# Altium schematic symbol library ADSP-BF548_EZ_KIT_Lite_Schematic.SchLib: 4 symbols
Pins are listed as number, name and electrical type; pins without a type are passive.

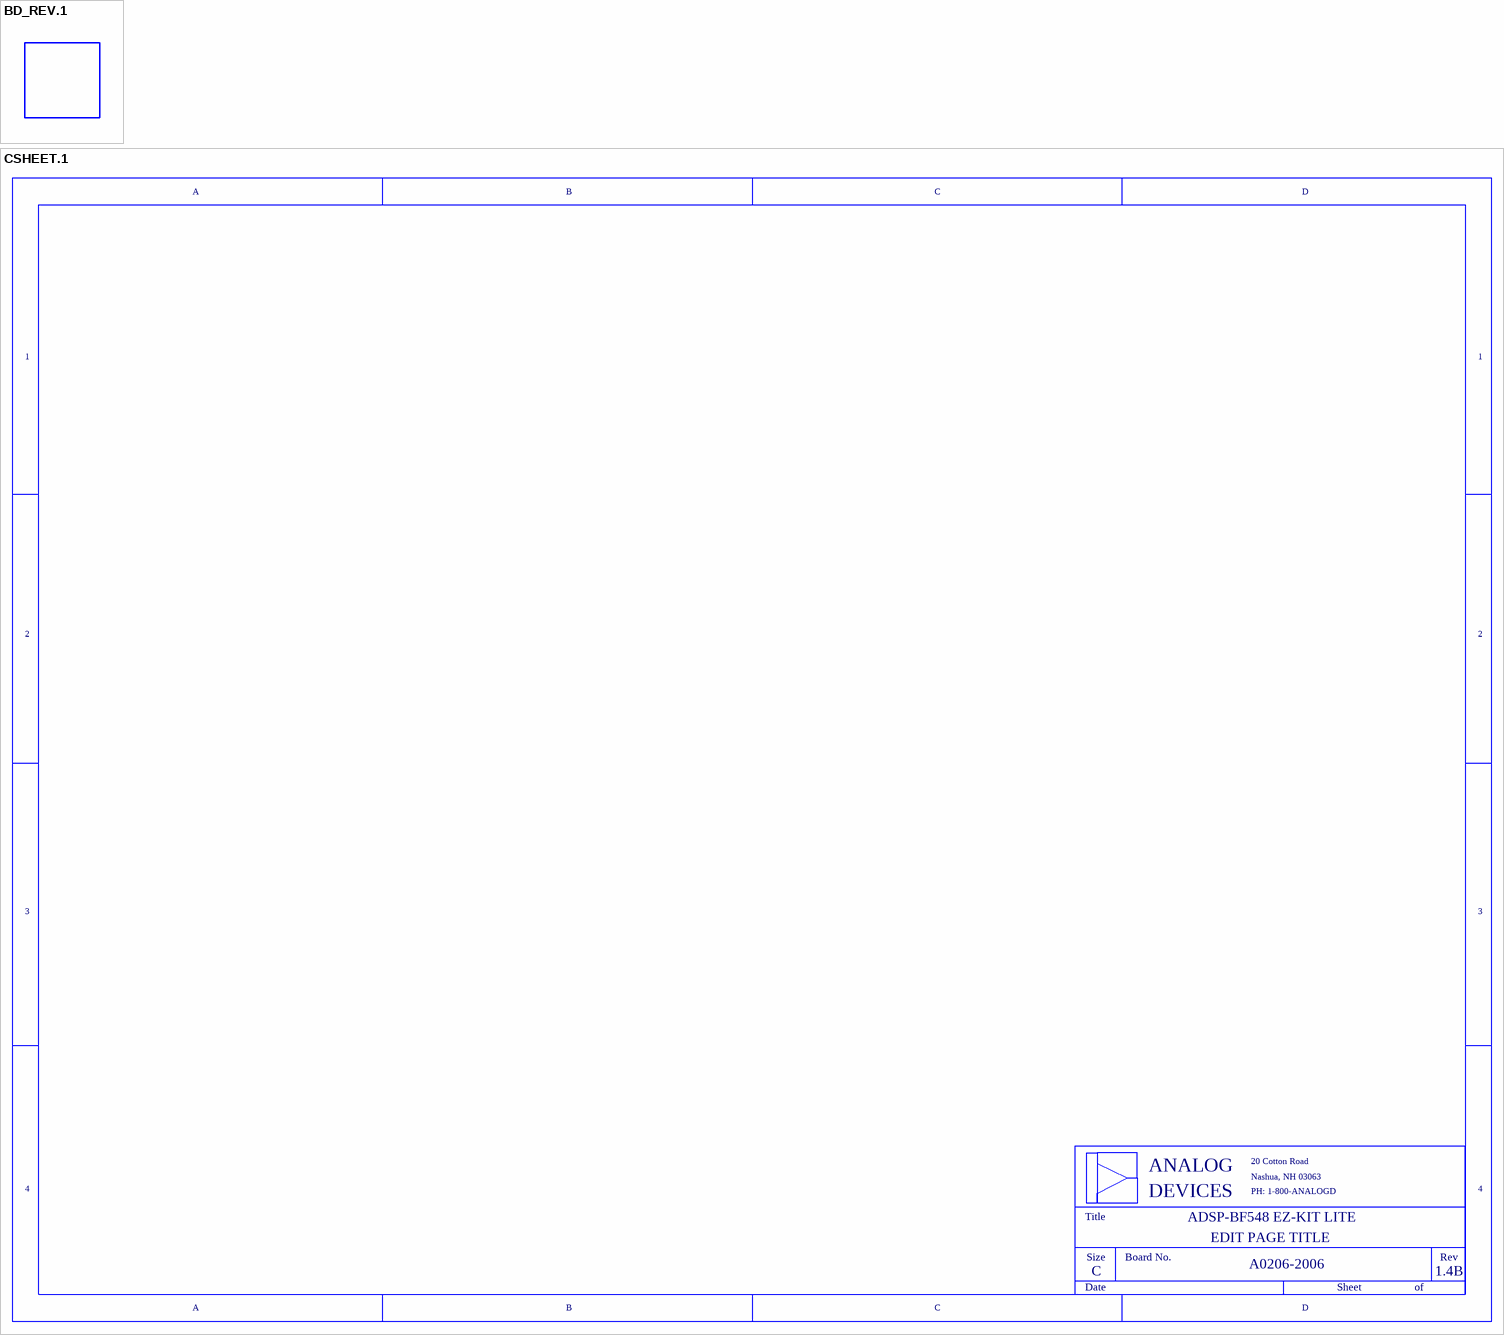
[diagram p0: symbols BD_REV.1 to CSHEET.1]

## BD_REV.1
designator *  (value not drawn)
CLASS: DNP; LEVEL: BD_REV

## CSHEET.1
designator ?  PDF_TITLE: EDIT PAGE TITLE  (graphical)
text: A; B; C; D; 1; 2; 3; 20 Cotton Road; ANALOG; Nashua, NH 03063; 4; PH: 1-800-ANALOGD; DEVICES; Title; ADSP-BF548 EZ-KIT LITE; Size; Board No.; Rev; A0206-2006; 1.4B; Date; Sheet; of

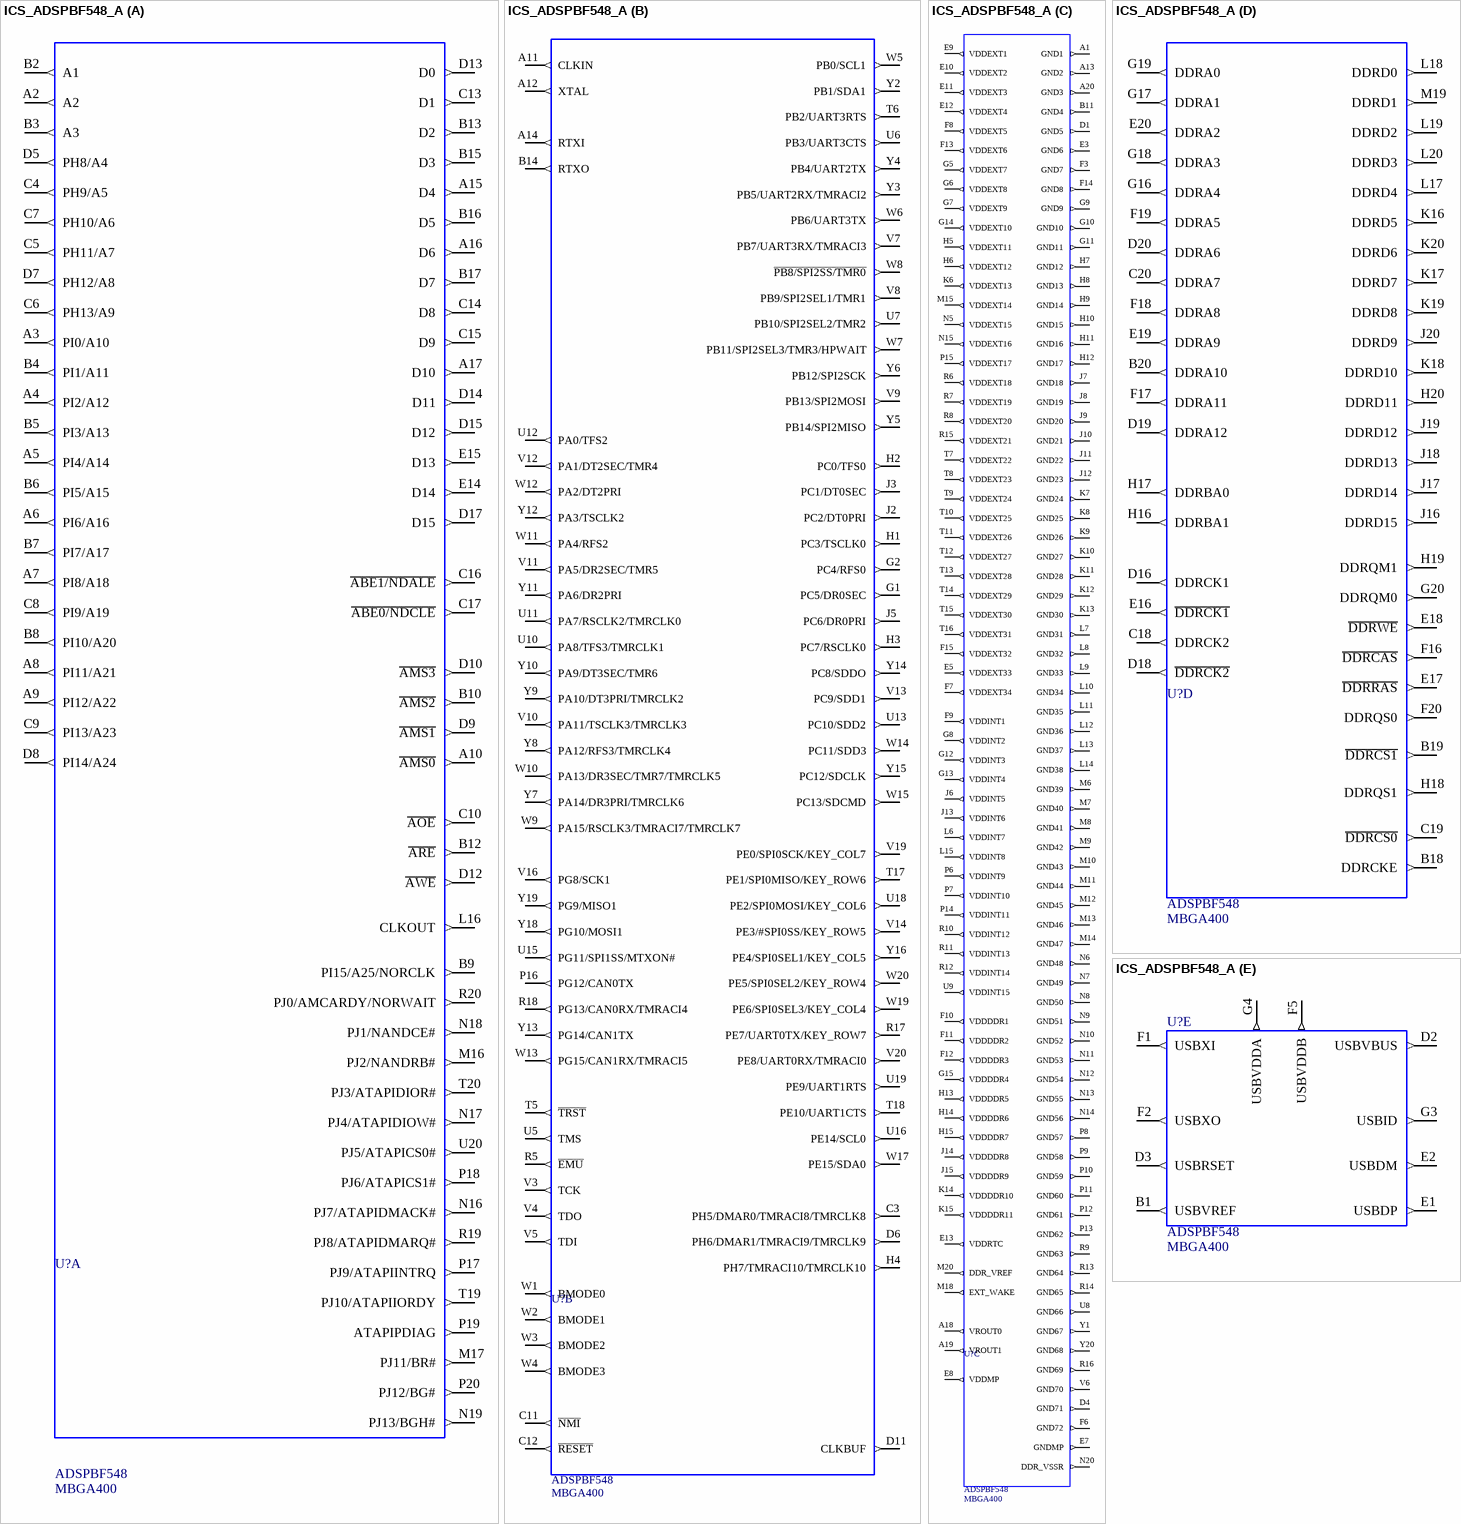
[diagram p1: symbol ICS_ADSPBF548_A]

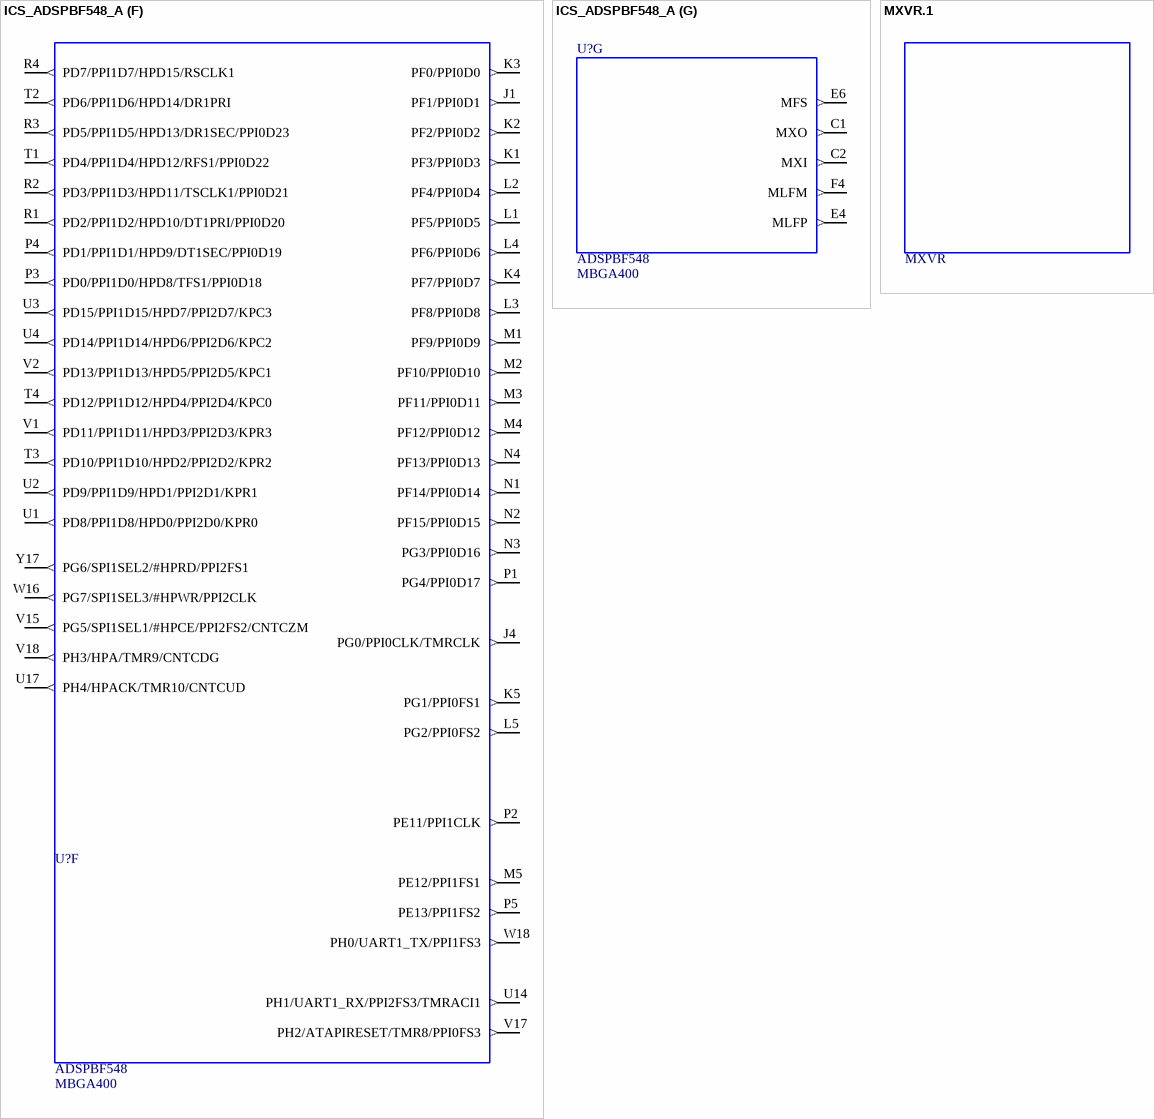
[diagram p2: symbols ICS_ADSPBF548_A to MXVR.1]

## ICS_ADSPBF548_A
designator U?, comment PART: ADSPBF548  PKG_TYPE: MBGA400  (hidden comment: ICS_ADSPBF548)
LEVEL: STD; DEVICE: ICS_ADSPBF548
part A pins: A2 (out), A3 PI0/A10 (out), A4 PI2/A12 (out), A5 PI4/A14 (out), A6 PI6/A16 (out), A7 PI8/A18 (out), A8 PI11/A21 (out), A9 PI12/A22 (out), A10 ~{AMS0} (out), A15 D4 (out), A16 D6 (out), A17 D10 (out), B2 A1 (out), B3 A3 (out), B4 PI1/A11 (out), B5 PI3/A13 (out), B6 PI5/A15 (out), B7 PI7/A17 (out), B8 PI10/A20 (out), B9 PI15/A25/NORCLK (out), B10 ~{AMS2} (out), B12 ~{ARE} (out), B13 D2 (out), B15 D3 (out), B16 D5 (out), B17 D7 (out), C4 PH9/A5 (out), C5 PH11/A7 (out), C6 PH13/A9 (out), C7 PH10/A6 (out), C8 PI9/A19 (out), C9 PI13/A23 (out), C10 ~{AOE} (out), C13 D1 (out), C14 D8 (out), C15 D9 (out), C16 ~{ABE1/NDALE} (out), C17 ~{ABE0/NDCLE} (out), D5 PH8/A4 (out), D7 PH12/A8 (out), D8 PI14/A24 (out), D9 ~{AMS1} (out), D10 ~{AMS3} (out), D12 ~{AWE} (out), D13 D0 (out), D14 D11 (out), D15 D12 (out), D17 D15 (out), E14 D14 (out), E15 D13 (out), L16 CLKOUT (out), M16 PJ2/NANDRB# (out), M17 PJ11/BR# (out), N16 PJ7/ATAPIDMACK# (out), N17 PJ4/ATAPIDIOW# (out), N18 PJ1/NANDCE# (out), N19 PJ13/BGH# (out), P17 PJ9/ATAPIINTRQ (out), P18 PJ6/ATAPICS1# (out), P19 ATAPIPDIAG (out), P20 PJ12/BG# (out), R19 PJ8/ATAPIDMARQ# (out), R20 PJ0/AMCARDY/NORWAIT (out), T19 PJ10/ATAPIIORDY (out), T20 PJ3/ATAPIDIOR# (out), U20 PJ5/ATAPICS0# (out)
part B pins: A11 CLKIN (out), A12 XTAL (out), A14 RTXI (out), B14 RTXO (out), C3 PH5/DMAR0/TMRACI8/TMRCLK8 (out), C11 ~{NMI} (out), C12 ~{RESET} (out), D6 PH6/DMAR1/TMRACI9/TMRCLK9 (out), D11 CLKBUF (out), G1 PC5/DR0SEC (out), G2 PC4/RFS0 (out), H1 PC3/TSCLK0 (out), H2 PC0/TFS0 (out), H3 PC7/RSCLK0 (out), H4 PH7/TMRACI10/TMRCLK10 (out), J2 PC2/DT0PRI (out), J3 PC1/DT0SEC (out), J5 PC6/DR0PRI (out), P16 PG12/CAN0TX (out), R5 ~{EMU} (out), R17 PE7/UART0TX/KEY_ROW7 (out), R18 PG13/CAN0RX/TMRACI4 (out), T5 ~{TRST} (out), T6 PB2/UART3RTS (out), T17 PE1/SPI0MISO/KEY_ROW6 (out), T18 PE10/UART1CTS (out), U5 TMS (out), U6 PB3/UART3CTS (out), U7 PB10/SPI2SEL2/TMR2 (out), U10 PA8/TFS3/TMRCLK1 (out), U11 PA7/RSCLK2/TMRCLK0 (out), U12 PA0/TFS2 (out), U13 PC10/SDD2 (out), U15 PG11/SPI1SS/MTXON# (out), U16 PE14/SCL0 (out), U18 PE2/SPI0MOSI/KEY_COL6 (out), U19 PE9/UART1RTS (out), V3 TCK (out), V4 TDO (out), V5 TDI (out), V7 PB7/UART3RX/TMRACI3 (out), V8 PB9/SPI2SEL1/TMR1 (out), V9 PB13/SPI2MOSI (out), V10 PA11/TSCLK3/TMRCLK3 (out), V11 PA5/DR2SEC/TMR5 (out), V12 PA1/DT2SEC/TMR4 (out), V13 PC9/SDD1 (out), V14 PE3/#SPI0SS/KEY_ROW5 (out), V16 PG8/SCK1 (out), V19 PE0/SPI0SCK/KEY_COL7 (out), V20 PE8/UART0RX/TMRACI0 (out), W1 BMODE0 (out), W2 BMODE1 (out), W3 BMODE2 (out), W4 BMODE3 (out), W5 PB0/SCL1 (out), W6 PB6/UART3TX (out), W7 PB11/SPI2SEL3/TMR3/HPWAIT (out), W8 ~{PB8/SPI2SS/TMR0} (out), W9 PA15/RSCLK3/TMRACI7/TMRCLK7 (out), W10 PA13/DR3SEC/TMR7/TMRCLK5 (out), W11 PA4/RFS2 (out), W12 PA2/DT2PRI (out), W13 PG15/CAN1RX/TMRACI5 (out), W14 PC11/SDD3 (out), W15 PC13/SDCMD (out), W17 PE15/SDA0 (out), W19 PE6/SPI0SEL3/KEY_COL4 (out), W20 PE5/SPI0SEL2/KEY_ROW4 (out), Y2 PB1/SDA1 (out), Y3 PB5/UART2RX/TMRACI2 (out), Y4 PB4/UART2TX (out), Y5 PB14/SPI2MISO (out), Y6 PB12/SPI2SCK (out), Y7 PA14/DR3PRI/TMRCLK6 (out), Y8 PA12/RFS3/TMRCLK4 (out), Y9 PA10/DT3PRI/TMRCLK2 (out), Y10 PA9/DT3SEC/TMR6 (out), Y11 PA6/DR2PRI (out), Y12 PA3/TSCLK2 (out), Y13 PG14/CAN1TX (out), Y14 PC8/SDDO (out), Y15 PC12/SDCLK (out), Y16 PE4/SPI0SEL1/KEY_COL5 (out), Y18 PG10/MOSI1 (out), Y19 PG9/MISO1 (out)
part C pins: A1 GND1 (out), A13 GND2 (out), A18 VROUT0 (out), A19 VROUT1 (out), A20 GND3 (out), B11 GND4 (out), D1 GND5 (out), D4 GND71 (out), E3 GND6 (out), E5 VDDEXT33 (out), E7 GNDMP (out), E8 VDDMP (out), E9 VDDEXT1 (out), E10 VDDEXT2 (out), E11 VDDEXT3 (out), E12 VDDEXT4 (out), E13 VDDRTC (out), F3 GND7 (out), F6 GND72 (out), F7 VDDEXT34 (out), F8 VDDEXT5 (out), F9 VDDINT1 (out), F10 VDDDDR1 (out), F11 VDDDDR2 (out), F12 VDDDDR3 (out), F13 VDDEXT6 (out), F14 GND8 (out), F15 VDDEXT32 (out), G5 VDDEXT7 (out), G6 VDDEXT8 (out), G7 VDDEXT9 (out), G8 VDDINT2 (out), G9 GND9 (out), G10 GND10 (out), G11 GND11 (out), G12 VDDINT3 (out), G13 VDDINT4 (out), G14 VDDEXT10 (out), G15 VDDDDR4 (out), H5 VDDEXT11 (out), H6 VDDEXT12 (out), H7 GND12 (out), H8 GND13 (out), H9 GND14 (out), H10 GND15 (out), H11 GND16 (out), H12 GND17 (out), H13 VDDDDR5 (out), H14 VDDDDR6 (out), H15 VDDDDR7 (out), J6 VDDINT5 (out), J7 GND18 (out), J8 GND19 (out), J9 GND20 (out), J10 GND21 (out), J11 GND22 (out), J12 GND23 (out), J13 VDDINT6 (out), J14 VDDDDR8 (out), J15 VDDDDR9 (out), K6 VDDEXT13 (out), K7 GND24 (out), K8 GND25 (out), K9 GND26 (out), K10 GND27 (out), K11 GND28 (out), K12 GND29 (out), K13 GND30 (out), K14 VDDDDR10 (out), K15 VDDDDR11 (out), L6 VDDINT7 (out), L7 GND31 (out), L8 GND32 (out), L9 GND33 (out), L10 GND34 (out), L11 GND35 (out), L12 GND36 (out), L13 GND37 (out), L14 GND38 (out), L15 VDDINT8 (out), M6 GND39 (out), M7 GND40 (out), M8 GND41 (out), M9 GND42 (out), M10 GND43 (out), M11 GND44 (out), M12 GND45 (out), M13 GND46 (out), M14 GND47 (out), M15 VDDEXT14 (out), M18 EXT_WAKE (out), M20 DDR_VREF (out), N5 VDDEXT15 (out), N6 GND48 (out), N7 GND49 (out), N8 GND50 (out), N9 GND51 (out), N10 GND52 (out), N11 GND53 (out), N12 GND54 (out), N13 GND55 (out), N14 GND56 (out), N15 VDDEXT16 (out), N20 DDR_VSSR (out), P6 VDDINT9 (out), P7 VDDINT10 (out), P8 GND57 (out), P9 GND58 (out), P10 GND59 (out), P11 GND60 (out), P12 GND61 (out), P13 GND62 (out), P14 VDDINT11 (out), P15 VDDEXT17 (out), R6 VDDEXT18 (out), R7 VDDEXT19 (out), R8 VDDEXT20 (out), R9 GND63 (out), R10 VDDINT12 (out), R11 VDDINT13 (out), R12 VDDINT14 (out), R13 GND64 (out), R14 GND65 (out), R15 VDDEXT21 (out), R16 GND69 (out), T7 VDDEXT22 (out), T8 VDDEXT23 (out), T9 VDDEXT24 (out), T10 VDDEXT25 (out), T11 VDDEXT26 (out), T12 VDDEXT27 (out), T13 VDDEXT28 (out), T14 VDDEXT29 (out), T15 VDDEXT30 (out), T16 VDDEXT31 (out), U8 GND66 (out), U9 VDDINT15 (out), V6 GND70 (out), Y1 GND67 (out), Y20 GND68 (out)
part D pins: B18 DDRCKE (out), B19 ~{DDRCS1} (out), B20 DDRA10 (out), C18 DDRCK2 (out), C19 ~{DDRCS0} (out), C20 DDRA7 (out), D16 DDRCK1 (out), D18 ~{DDRCK2} (out), D19 DDRA12 (out), D20 DDRA6 (out), E16 ~{DDRCK1} (out), E17 ~{DDRRAS} (out), E18 ~{DDRWE} (out), E19 DDRA9 (out), E20 DDRA2 (out), F16 ~{DDRCAS} (out), F17 DDRA11 (out), F18 DDRA8 (out), F19 DDRA5 (out), F20 DDRQS0 (out), G16 DDRA4 (out), G17 DDRA1 (out), G18 DDRA3 (out), G19 DDRA0 (out), G20 DDRQM0 (out), H16 DDRBA1 (out), H17 DDRBA0 (out), H18 DDRQS1 (out), H19 DDRQM1 (out), H20 DDRD11 (out), J16 DDRD15 (out), J17 DDRD14 (out), J18 DDRD13 (out), J19 DDRD12 (out), J20 DDRD9 (out), K16 DDRD5 (out), K17 DDRD7 (out), K18 DDRD10 (out), K19 DDRD8 (out), K20 DDRD6 (out), L17 DDRD4 (out), L18 DDRD0 (out), L19 DDRD2 (out), L20 DDRD3 (out), M19 DDRD1 (out)
part E pins: B1 USBVREF (out), D2 USBVBUS (out), D3 USBRSET (out), E1 USBDP (out), E2 USBDM (out), F1 USBXI (out), F2 USBXO (out), F5 USBVDDB (out), G3 USBID (out), G4 USBVDDA (out)
part F pins: J1 PF1/PPI0D1 (out), J4 PG0/PPI0CLK/TMRCLK (out), K1 PF3/PPI0D3 (out), K2 PF2/PPI0D2 (out), K3 PF0/PPI0D0 (out), K4 PF7/PPI0D7 (out), K5 PG1/PPI0FS1 (out), L1 PF5/PPI0D5 (out), L2 PF4/PPI0D4 (out), L3 PF8/PPI0D8 (out), L4 PF6/PPI0D6 (out), L5 PG2/PPI0FS2 (out), M1 PF9/PPI0D9 (out), M2 PF10/PPI0D10 (out), M3 PF11/PPI0D11 (out), M4 PF12/PPI0D12 (out), M5 PE12/PPI1FS1 (out), N1 PF14/PPI0D14 (out), N2 PF15/PPI0D15 (out), N3 PG3/PPI0D16 (out), N4 PF13/PPI0D13 (out), P1 PG4/PPI0D17 (out), P2 PE11/PPI1CLK (out), P3 PD0/PPI1D0/HPD8/TFS1/PPI0D18 (out), P4 PD1/PPI1D1/HPD9/DT1SEC/PPI0D19 (out), P5 PE13/PPI1FS2 (out), R1 PD2/PPI1D2/HPD10/DT1PRI/PPI0D20 (out), R2 PD3/PPI1D3/HPD11/TSCLK1/PPI0D21 (out), R3 PD5/PPI1D5/HPD13/DR1SEC/PPI0D23 (out), R4 PD7/PPI1D7/HPD15/RSCLK1 (out), T1 PD4/PPI1D4/HPD12/RFS1/PPI0D22 (out), T2 PD6/PPI1D6/HPD14/DR1PRI (out), T3 PD10/PPI1D10/HPD2/PPI2D2/KPR2 (out), T4 PD12/PPI1D12/HPD4/PPI2D4/KPC0 (out), U1 PD8/PPI1D8/HPD0/PPI2D0/KPR0 (out), U2 PD9/PPI1D9/HPD1/PPI2D1/KPR1 (out), U3 PD15/PPI1D15/HPD7/PPI2D7/KPC3 (out), U4 PD14/PPI1D14/HPD6/PPI2D6/KPC2 (out), U14 PH1/UART1_RX/PPI2FS3/TMRACI1 (out), U17 PH4/HPACK/TMR10/CNTCUD (out), V1 PD11/PPI1D11/HPD3/PPI2D3/KPR3 (out), V2 PD13/PPI1D13/HPD5/PPI2D5/KPC1 (out), V15 PG5/SPI1SEL1/#HPCE/PPI2FS2/CNTCZM (out), V17 PH2/ATAPIRESET/TMR8/PPI0FS3 (out), V18 PH3/HPA/TMR9/CNTCDG (out), W16 PG7/SPI1SEL3/#HPWR/PPI2CLK (out), W18 PH0/UART1_TX/PPI1FS3 (out), Y17 PG6/SPI1SEL2/#HPRD/PPI2FS1 (out)
part G pins: C1 MXO (out), C2 MXI (out), E4 MLFP (out), E6 MFS (out), F4 MLFM (out)

## MXVR.1
designator *, comment MXVR
CLASS: MXVR; PART: MXVR; PKG_TYPE: MXVR; LEVEL: MXVR; DEVICE: MXVR
footprint MXVR